# Altium footprint library Francisco_PCB.PcbLib: 51 footprints (part 2 of 4)
Each footprint in its own frame and in the unit in brackets; x right, y up, seen from the top. Pads: shape width x height; smd on the part's side, far side on the other; paste and mask are expansions set on the pad; w line width, h text height; cw(c..) or ccw(c..) is an arc to the next point about the centre after c.
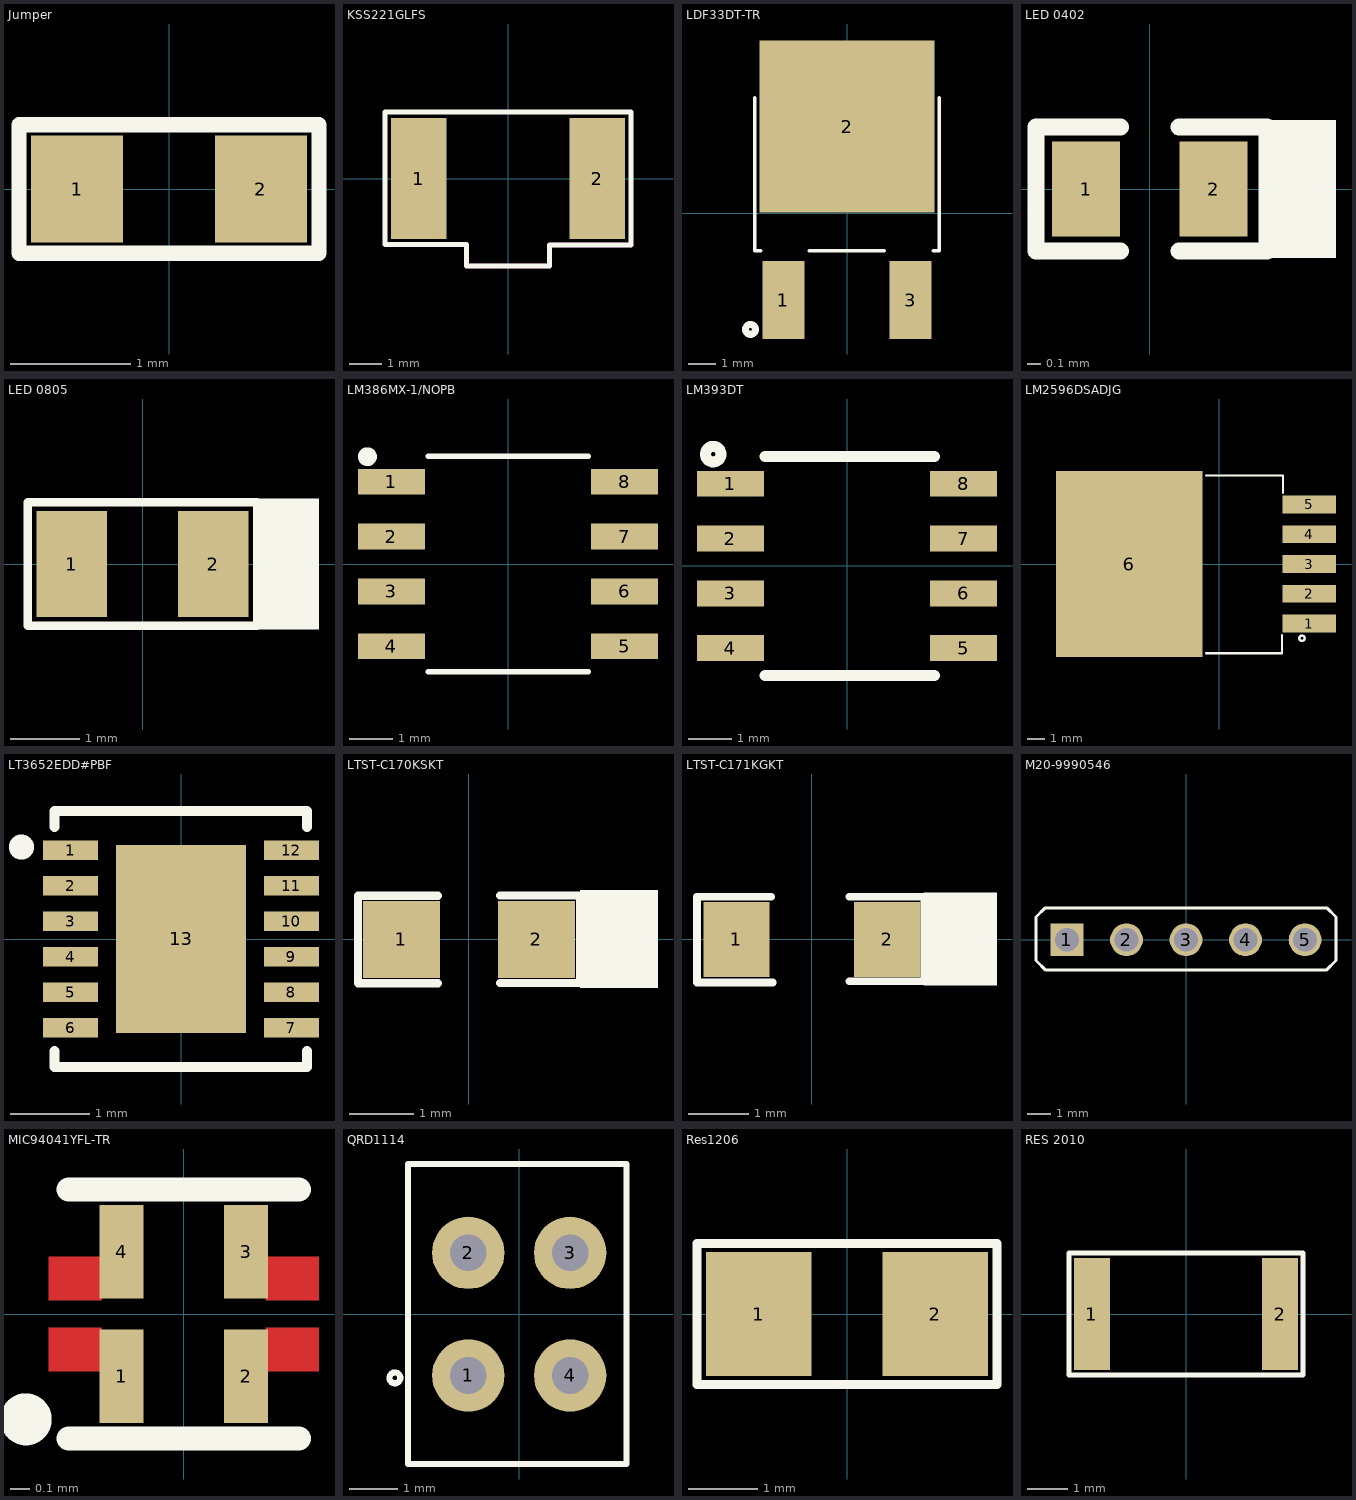
[diagram p1: the footprints below, top view; thin cyan lines are the x and y axes]

## Jumper [mil]
pads (2):
  rect 30x35 smd: 1(-30,0) 2(30,0)
Top Overlay:
  lines w5: -49,-21 49,-21 49,21 -49,21 -49,-21

## KSS221GLFS [mm]
pads (2):
  rect 1.7x3.7 smd: 1(-2.725,0) 2(2.725,0)
Top Overlay:
  lines w0.152: -3.759,-2.007 -1.27,-2.007 -1.27,-2.667 1.27,-2.667 1.27,-2.032 3.759,-2.032 3.759,2.032 -3.759,2.032 -3.759,-2.007
Keep-Out Layer:
  lines w0.152: -3.759,-2.007 -1.27,-2.007 -1.27,-2.667 1.27,-2.667 1.27,-2.032 3.759,-2.032
3D body "KSS221GLFS.stp": height 1.65, standoff 0, extent -3.5,-2.574 3.5,1.836

## LDF33DT-TR [mm]
pads (3):
  rect 1.5x2.8 smd: 1(-2.286,-3.125) 3(2.286,-3.125)
  rect 6.3x6.2 smd: 2(0,3.125)
Top Overlay:
  circle w0.254: c-3.476,-4.18 r0.177
  lines w0.127: -3.322,4.158 -3.322,-1.342 -3.102,-1.342 ; -1.364,-1.342 1.342,-1.342 ; 3.102,-1.342 3.322,-1.342 3.322,4.158
3D body "LDF33DT-TR.STEP": height 2.4, standoff -0.23, extent -3.27,-3.844 3.27,6.031

## LED 0402 [mm] "LED BLUE CLEAR CHIP SMD"
pads (2):
  rect 0.5x0.7 smd: 1(-0.47,0) 2(0.47,0)
Top Overlay:
  rectangle: 0.864,-0.508 1.372,0.508
  lines w0.127: -0.216,-0.457 -0.838,-0.457 -0.838,0.457 -0.216,0.457 ; 0.216,-0.457 0.864,-0.457 0.864,0.457 0.216,0.457
3D body "APHHS1005.STEP": height 0.5, standoff 0, extent -0.5,-0.25 0.5,0.25

## LED 0805 [mil] "SMD 0805"
pads (2):
  rect 40x60 smd: 1(-40,0) 2(40,0)
Top Overlay:
  region: 100,37 64,37 64,-37 100,-37
  lines w5: -65,-35 65,-35 65,35 -65,35 -65,-35
3D body "User Library-User Library-led_0805 GRE.step": height 43.31, standoff 0, extent -39.77,-24.61 39.76,24.6

## LM386MX-1/NOPB [mm]
pads (8):
  rect 1.55x0.6 smd: 1(-2.7,1.905) 2(-2.7,0.635) 3(-2.7,-0.635) 4(-2.7,-1.905) 5(2.7,-1.905) 6(2.7,-0.635) 7(2.7,0.635) 8(2.7,1.905)
Top Overlay:
  circle w0.254: c-3.256,2.486 r0.091
  lines w0.127: -1.842,-2.499 1.854,-2.499 ; -1.842,2.499 1.854,2.499
3D body "NOPB.STEP": height 1.75, standoff 0, extent -3.013,-2.438 2.981,2.464

## LM393DT [mm]
pads (8):
  rect 1.55x0.6 smd: 1(-2.7,1.905) 2(-2.7,0.635) 3(-2.7,-0.635) 4(-2.7,-1.905) 5(2.7,-1.905) 6(2.7,-0.635) 7(2.7,0.635) 8(2.7,1.905)
Top Overlay:
  circle w0.254: c-3.099,2.591 r0.18
  lines w0.254: -1.905,-2.54 2.032,-2.54 ; -1.905,2.54 2.032,2.54
3D body "User Library-SOIC-8-1.STEP": height 1.65, standoff -0.1, extent -2.906,-2.413 3.094,2.487

## LM2596DSADJG [mm]
pads (6):
  rect 3.05x1.016 smd: 1(5.152,-3.404) 2(5.152,-1.702) 3(5.152,0) 4(5.152,1.702) 5(5.152,3.404)
  rect 8.38x10.66 smd: 6(-5.152,0)
Top Overlay:
  circle w0.127: c4.73,-4.246 r0.154
  lines w0.127: -0.748,-5.104 3.586,-5.104 3.586,-4.07 ; -0.748,5.06 3.652,5.06 3.652,4.07
3D body "D2PAK-5_ONS.step": height 4.57, standoff -0.05, extent -5.784,-5.038 5.749,4.994

## LT3652EDD#PBF [mm]
pads (13):
  rect 0.7x0.25 smd: 1(-1.4,1.125) 2(-1.4,0.675) 3(-1.4,0.225) 4(-1.4,-0.225) 5(-1.4,-0.675) 6(-1.4,-1.125) 7(1.4,-1.125) 8(1.4,-0.675) 9(1.4,-0.225) 10(1.4,0.225) 11(1.4,0.675) 12(1.4,1.125)
  rect 1.65x2.38 smd: 13(0,0)
Top Overlay:
  circle w0.254: c-2.024,1.166 r0.031
  lines w0.127: -1.603,-1.422 -1.603,-1.621 1.6,-1.621 1.6,-1.422 ; -1.603,1.422 -1.603,1.621 1.6,1.621 1.6,1.422
3D body "DFN-12_DD_LIT.step": height 0.8, standoff 0, extent -1.55,-1.55 1.55,1.55

## LTST-C170KSKT [mm] "Yellow 0805 Light Emitting Diodes (LED) ROHS"
pads (2):
  rect 1.2x1.2 smd: 1(-1.05,0) 2(1.05,0)
Top Overlay:
  rectangle: 1.731,-0.758 2.946,0.773
  lines w0.127: -0.479,-0.681 -1.727,-0.681 -1.727,0.681 -0.479,0.681 ; 0.483,-0.677 1.731,-0.677 1.731,0.686 0.483,0.686
3D body "everlight-17-21-0805LED-YELLOW.STEP": height 1.1, standoff -0.01, extent -1,-0.625 1,0.625

## LTST-C171KGKT [mm] "Green 0805 Light Emitting Diodes (LED)"
pads (2):
  rect 1.1x1.25 smd: 1(-1.25,0) 2(1.25,0)
Top Overlay:
  rectangle: 1.856,-0.765 3.073,0.781
  lines w0.127: -0.676,0.709 -1.905,0.709 -1.905,-0.714 -0.651,-0.714 ; 0.622,-0.691 1.867,-0.691 1.867,0.711 0.622,0.711
3D body "everlight-17-21-0805LED-GREEN.STEP": height 1.1, standoff -0.01, extent -1,-0.625 1,0.625

## M20-9990546 [mm]
pads (5):
  rect 1.4x1.4 hole 1.02: 1(-5.08,0)
  round 1.4 hole 1.02: 2(-2.54,0) 3(0,0) 4(2.54,0) 5(5.08,0)
Top Overlay:
  lines w0.127: -6.402,-0.88 -6.402,0.968 -6.006,1.364 6.006,1.364 6.402,0.968 6.402,-0.88 5.984,-1.298 -5.984,-1.298 -6.402,-0.88
3D body "m20-9990546_asm.stp": height 8.06, standoff -3.62, extent -6.35,-1.232 6.35,1.308

## MIC94041YFL-TR [mm]
pads (4):
  rect 0.23x0.49 smd mask+0.055: 1(-0.325,-0.325) 2(0.325,-0.325) 3(0.325,0.325) 4(-0.325,0.325)
Top Layer:
  region: 0.706,-0.071 0.427,-0.071 0.427,-0.301 0.706,-0.301
  rectangle: -0.706,-0.301 -0.427,-0.071
  rectangle: -0.706,0.071 -0.427,0.301
  region: 0.706,0.301 0.427,0.301 0.427,0.071 0.706,0.071
Top Overlay:
  circle w0.2: c-0.825,-0.55 r0.035
  lines w0.127: -0.6,-0.65 0,-0.65 0.6,-0.65 ; -0.6,0.65 0,0.65 0.6,0.65
3D body "MIC94041YFL-TR.stp": height 0.9, standoff 0, extent -0.6,-0.6 0.6,0.6

## QRD1114 [mm]
pads (4):
  round 1.5 hole 0.76: 1(-1.055,-1.27) 2(-1.055,1.27) 3(1.055,1.27) 4(1.055,-1.27)
Top Overlay:
  circle w0.127: c-2.574,-1.32 r0.112
  lines w0.127: -2.301,-3.102 -2.301,3.108 2.222,3.108 2.222,-3.102 -2.301,-3.102
3D body "ON Semiconductor QRD1113 QRD1114 SENSR OPTO TRANS 1.27MM REFL PCB.STEP": height 4.65, standoff -12.7, extent -2.234,-3.048 2.156,3.052

## Res1206 [mil]
pads (2):
  rect 60x70 smd: 1(-50,0) 2(50,0)
Top Overlay:
  lines w5: -85,-40 85,-40 85,40 -85,40 -85,-40
3D body "User Library-1206 SMD Resistor.step": height 39.45, standoff 0, extent -62.99,-31.49 63,31.51

## RES 2010 [mm] "RES 50M OHM 1% 3/4W 2010"
pads (2):
  rect 0.9x2.8 smd: 1(-2.35,0) 2(2.35,0)
Top Overlay:
  lines w0.127: -2.921,-1.524 2.921,-1.524 2.921,1.524 -2.921,1.524 -2.921,-1.524
3D body "User Library-R_2010.STEP": height 0.6, standoff 0, extent -2.5,-1.25 2.5,1.25